# Altium footprint library LimeMicroAltiumLib.PcbLib: 876 footprints (part 1 of 57)
Each footprint in its own frame and in the unit in brackets; x right, y up, seen from the top. Pads: shape width x height; smd on the part's side, far side on the other; paste and mask are expansions set on the pad; w line width, h text height; cw(c..) or ccw(c..) is an arc to the next point about the centre after c.
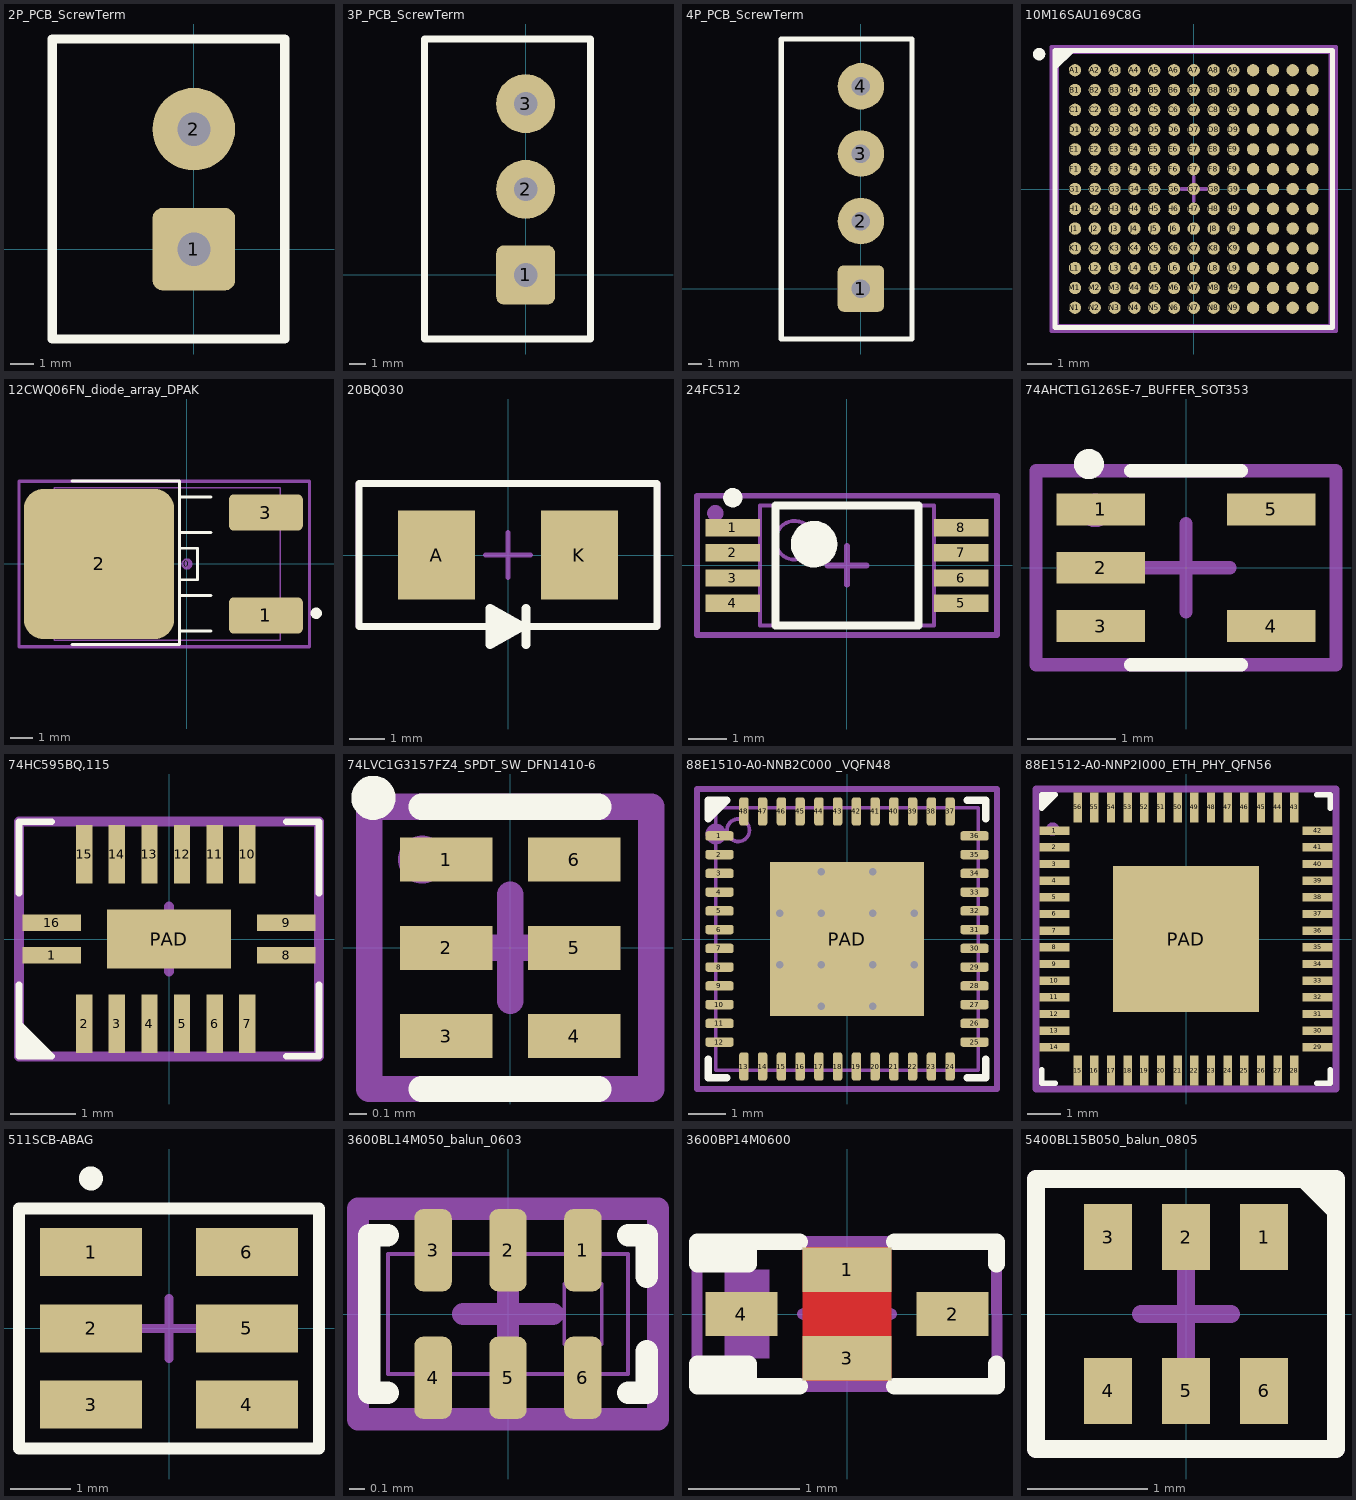
[diagram p0: the footprints below, top view; thin cyan lines are the x and y axes]

## 2P_PCB_ScrewTerm [mm] "TERM BLOCK 2POS SIDE"
height 8.5
pads (2):
  rrect25% 3.5x3.5 hole 1.4: 1(0,0)
  round 3.5 hole 1.4: 2(0,5.08)
Top Overlay:
  lines w0.4: -6,-3.8 3.85,-3.8 3.85,8.9 -6,8.9 -6,-3.8
Mechanical 13:
  lines w0.076: -6,-3.8 3.8,-3.8 3.8,8.875 -6,8.875 -6,-3.8
Mechanical 15:
  lines w0.15: 3.4,-3.8 -6,-3.8 -6,8.8 3.9,8.8 3.9,-3.8
  text ".designator" at -0.1,2.5 h0.55
3D body "terminal_blocks_a-tb500vj02h.stp": height 19, standoff -4, extent -5.503,-3.098 5,8.098

## 3P_PCB_ScrewTerm [mm] "TERM BLOCK 3POS SIDE"
height 8.5
pads (3):
  rrect25% 3.5x3.5 hole 1.4: 1(0,0)
  round 3.5 hole 1.4: 2(0,5.08) 3(0,10.16)
Top Overlay:
  lines w0.4: -6,-3.8 3.85,-3.8 3.85,14 -6,14 -6,-3.8
Mechanical 13:
  lines w0.076: -6,-3.8 3.8,-3.8 3.8,14 -6,14 -6,-3.8
Mechanical 15:
  lines w0.15: -3.4,13.96 3.8,13.96 ; 3.4,-3.8 -6,-3.8 -6,14 3.9,14 3.9,-3.8
  text ".designator" at 0,5.08 h0.55
3D body "terminal_blocks_a-tb500vj02h.stp": height 19, standoff -4, extent -5.503,1.982 5,13.178
3D body "terminal_blocks_a-tb500vj02h.stp": height 19, standoff -4, extent -5.503,-3.098 5,8.098

## 4P_PCB_ScrewTerm [mm] "TERM BLOCK 10POS SIDE ENT 3.81MM"
height 8.5
pads (4):
  rrect25% 3.5x3.5 hole 1.4: 1(0,0)
  round 3.5 hole 1.4: 2(0,5.08) 3(0,10.16) 4(0,15.24)
Top Overlay:
  lines w0.4: -6,-3.8 3.85,-3.8 3.85,18.8 -6,18.8 -6,-3.8
Mechanical 13:
  lines w0.076: -6,-3.8 3.8,-3.8 3.8,18.8 -6,18.8 -6,-3.8
Mechanical 15:
  lines w0.15: 3.4,-3.8 -6,-3.8 -6,18.8 3.9,18.8 3.9,-3.8
  text ".designator" at -0.1,7.6 h0.55
3D body "terminal_blocks_a-tb500vj02h.stp": height 19, standoff -4, extent -5.503,-2.998 5,8.198
3D body "terminal_blocks_a-tb500vj02h.stp": height 19, standoff -4, extent -5.503,6.962 5,18.158

## 10M16SAU169C8G [mm] "BGA, 169-Leads, Body 11,00x11,00mmx1,55mm, Pitch 0,80mm"
height 1.55
pads (169):
  round 0.5 smd mask+0.05: A1(-4.8,4.8) A2(-4,4.8) A3(-3.2,4.8) A4(-2.4,4.8) A5(-1.6,4.8) A6(-0.8,4.8) A7(0,4.8) A8(0.8,4.8) A9(1.6,4.8) A10(2.4,4.8) A11(3.2,4.8) A12(4,4.8) A13(4.8,4.8) B1(-4.8,4) B2(-4,4) B3(-3.2,4) B4(-2.4,4) B5(-1.6,4) B6(-0.8,4) B7(0,4) B8(0.8,4) B9(1.6,4) B10(2.4,4) B11(3.2,4) B12(4,4) B13(4.8,4) C1(-4.8,3.2) C2(-4,3.2) C3(-3.2,3.2) C4(-2.4,3.2) C5(-1.6,3.2) C6(-0.8,3.2) C7(0,3.2) C8(0.8,3.2) C9(1.6,3.2) C10(2.4,3.2) C11(3.2,3.2) C12(4,3.2) C13(4.8,3.2) D1(-4.8,2.4) D2(-4,2.4) D3(-3.2,2.4) D4(-2.4,2.4) D5(-1.6,2.4) D6(-0.8,2.4) D7(0,2.4) D8(0.8,2.4) D9(1.6,2.4) D10(2.4,2.4) D11(3.2,2.4) D12(4,2.4) D13(4.8,2.4) E1(-4.8,1.6) E2(-4,1.6) E3(-3.2,1.6) E4(-2.4,1.6) E5(-1.6,1.6) E6(-0.8,1.6) E7(0,1.6) E8(0.8,1.6) E9(1.6,1.6) E10(2.4,1.6) E11(3.2,1.6) E12(4,1.6) E13(4.8,1.6) F1(-4.8,0.8) F2(-4,0.8) F3(-3.2,0.8) F4(-2.4,0.8) F5(-1.6,0.8) F6(-0.8,0.8) F7(0,0.8) F8(0.8,0.8) F9(1.6,0.8) F10(2.4,0.8) F11(3.2,0.8) F12(4,0.8) F13(4.8,0.8) G1(-4.8,0) G2(-4,0) G3(-3.2,0) G4(-2.4,0) G5(-1.6,0) G6(-0.8,0) G7(0,0) G8(0.8,0) G9(1.6,0) G10(2.4,0) G11(3.2,0) G12(4,0) G13(4.8,0) H1(-4.8,-0.8) H2(-4,-0.8) H3(-3.2,-0.8) H4(-2.4,-0.8) H5(-1.6,-0.8) H6(-0.8,-0.8) H7(0,-0.8) H8(0.8,-0.8) H9(1.6,-0.8) H10(2.4,-0.8) H11(3.2,-0.8) H12(4,-0.8) H13(4.8,-0.8) J1(-4.8,-1.6) J2(-4,-1.6) J3(-3.2,-1.6) J4(-2.4,-1.6) J5(-1.6,-1.6) J6(-0.8,-1.6) J7(0,-1.6) J8(0.8,-1.6) J9(1.6,-1.6) J10(2.4,-1.6) J11(3.2,-1.6) J12(4,-1.6) J13(4.8,-1.6) K1(-4.8,-2.4) K2(-4,-2.4) K3(-3.2,-2.4) K4(-2.4,-2.4) K5(-1.6,-2.4) K6(-0.8,-2.4) K7(0,-2.4) K8(0.8,-2.4) K9(1.6,-2.4) K10(2.4,-2.4) K11(3.2,-2.4) K12(4,-2.4) K13(4.8,-2.4) L1(-4.8,-3.2) L2(-4,-3.2) L3(-3.2,-3.2) L4(-2.4,-3.2) L5(-1.6,-3.2) L6(-0.8,-3.2) L7(0,-3.2) L8(0.8,-3.2) L9(1.6,-3.2) L10(2.4,-3.2) L11(3.2,-3.2) L12(4,-3.2) L13(4.8,-3.2) M1(-4.8,-4) M2(-4,-4) M3(-3.2,-4) M4(-2.4,-4) M5(-1.6,-4) M6(-0.8,-4) M7(0,-4) M8(0.8,-4) M9(1.6,-4) M10(2.4,-4) M11(3.2,-4) M12(4,-4) M13(4.8,-4) N1(-4.8,-4.8) N2(-4,-4.8) N3(-3.2,-4.8) N4(-2.4,-4.8) N5(-1.6,-4.8) N6(-0.8,-4.8) N7(0,-4.8) N8(0.8,-4.8) N9(1.6,-4.8) N10(2.4,-4.8) N11(3.2,-4.8) N12(4,-4.8) N13(4.8,-4.8)
Top Overlay:
  circle w0.25: c-6.25,5.45 r0.125
  region: -4.919,5.6 -5.6,4.919 -5.6,5.6
  lines w0.2: -5.6,4.919 -4.919,5.6 ; -5.6,-5.6 -5.6,5.6 5.6,5.6 5.6,-5.6 -5.6,-5.6
Mechanical 13:
  lines w0.1: -5.5,-5.5 -5.5,5.5 5.5,5.5 5.5,-5.5 -5.5,-5.5
Mechanical 15:
  circle w0.2: c-4.8,4.8 r0.1
  lines w0.15: -0.5,0 0.5,0 ; 0,-0.5 0,0.5 ; -5.75,-5.75 -5.75,5.75 5.75,5.75 5.75,-5.75 -5.75,-5.75
  text ".Designator" at 0,0 h0.55
3D body: height 1.55, standoff 0, extent -5.5,-5.5 5.5,5.5
3D body: height 1.65, standoff 1.55, extent -5.2,4.4 -4.4,5.2

## 12CWQ06FN_diode_array_DPAK [mm]
pads (4):
  round 0.508 on Mech15: 0(0,0)
  rrect25% 3.3x1.6 smd: 1(3.526,-2.3) 3(3.526,2.3)
  rrect25% 6.7x6.7 smd: 2(-3.926,0)
Top Overlay:
  circle w0.25: c5.774,-2.2 r0.125
  lines w0.127: -5.126,-3.6 -0.326,-3.6 -0.326,3.7 -5.126,3.7 ; 1.074,-3 -0.326,-3 -0.326,-1.4 1.074,-1.4 ; 1.074,1.4 -0.326,1.4 -0.326,3 1.074,3 ; -0.326,-0.7 0.474,-0.7 0.474,0.7 -0.326,0.7 -0.326,-0.7
Mechanical 13:
  lines w0.076: -5.928,-3.4 -5.928,3.4 4.174,3.4 4.174,-3.4 -5.928,-3.4
Mechanical 15:
  circle w0.3: c3.674,-2.2 r0.1
  lines w0.15: -7.5,-3.7 5.474,-3.7 5.474,3.7 -7.5,3.7 -7.5,-3.7
  text ".Designator" at 0,0 h0.55
3D body "User Library-DPAK_TO-252AA.step": height 2.37, standoff -0.03, extent -5.928,-3.367 4.172,3.367

## 20BQ030 [mm]
pads (2):
  rect 2.15x2.5 smd: A(-2,0) K(2,0)
Top Overlay:
  lines w0.2: -4.175,-2 4.175,-2 4.175,2 -4.175,2 -4.175,0 -4.175,-2
  lines w0.254: -0.5,-2.2 -0.1,-2.2 ; -0.5,-2 -0.3,-2 0.4,-2 ; -0.5,-1.8 0,-1.8 ; 0.5,-2.5 0.5,-1.5 ; 0.4,-2 -0.5,-2.5 -0.5,-1.5 0.4,-2
Mechanical 15:
  lines w0.15: -0.625,0 0,0 ; -0.5,-2.2 -0.1,-2.2 ; -0.5,-2 -0.3,-2 0.4,-2 ; -0.5,-1.8 0,-1.8 ; 0,-0.625 0,0 ; 0,0.625 0,0 ; 0.5,-2.5 0.5,-1.5 ; 0.625,0 0,0 ; 0.4,-2 -0.5,-1.5 -0.5,-2.5 0.4,-2 ; -4.2,-2 4.2,-2 4.2,2 -4.2,2 -4.2,-2
  text ".Designator" at 0,0 h0.55

## 24FC512 [mm] "TSOP, 8-Leads, Body 3,00x4,40mm, Pitch 0,65mm, IPC Medium Density"
height 1.2
pads (8):
  rect 1.4x0.45 smd mask+0.05: 1(-2.95,0.975) 2(-2.95,0.325) 3(-2.95,-0.325) 4(-2.95,-0.975) 5(2.95,-0.975) 6(2.95,-0.325) 7(2.95,0.325) 8(2.95,0.975)
Top Overlay:
  circle w0.25: c-2.95,1.75 r0.125
  circle w0.6: c-0.85,0.55 r0.3
  lines w0.2: -1.85,-1.55 -1.85,1.55 1.85,1.55 1.85,-1.55 -1.85,-1.55
Mechanical 13:
  circle w0.1: c-1.35,0.65 r0.5
  lines w0.1: -2.25,-1.55 -2.25,1.55 2.25,1.55 2.25,-1.55 -2.25,-1.55
Mechanical 15:
  circle w0.35: c-3.4,1.35 r0.035
  lines w0.15: -0.5,0 0.5,0 ; 0,-0.5 0,0.5 ; -3.875,-1.8 -3.875,1.8 3.875,1.8 3.875,-1.8 -3.875,-1.8
  text ".Designator" at 0,0 h0.55
3D body "TSSOP-8.STEP": height 1.19, standoff -0.01, extent -3.25,-1.55 3.25,1.55

## 74AHCT1G126SE-7_BUFFER_SOT353 [mm]
pads (5):
  rect 1x0.36 smd mask+0.05: 1(-0.965,0.66) 2(-0.965,0) 3(-0.965,-0.66) 4(0.965,-0.66) 5(0.965,0.66)
Top Overlay:
  circle w0.2: c-1.1,1.175 r0.071
  lines w0.15: -0.625,-1.1 0.625,-1.1 ; -0.625,1.1 0.625,1.1
Mechanical 15:
  circle w0.2: c-1.025,0.65 r0.09
  lines w0.15: -0.5,0 0,0 ; 0,-0.5 0,0 ; 0,0.5 0,0 ; 0.5,0 0,0 ; -1.7,-1.1 1.7,-1.1 1.7,1.1 -1.7,1.1 -1.7,-1.1
  text ".Designator" at 0,0 h0.55
3D body "User Library-sot353.step": height 1, standoff 0, extent -1.15,-1.05 1.15,1.05

## 74HC595BQ,115 [mm]
pads (17):
  rect 0.9x0.25 smd mask+0.05: 1(-1.8,-0.25) 8(1.8,-0.25) 9(1.8,0.25) 16(-1.8,0.25)
  rect 0.25x0.9 smd mask+0.05: 2(-1.3,-1.3) 3(-0.8,-1.3) 4(-0.3,-1.3) 5(0.2,-1.3) 6(0.7,-1.3) 7(1.2,-1.3) 10(1.2,1.3) 11(0.7,1.3) 12(0.2,1.3) 13(-0.3,1.3) 14(-0.8,1.3) 15(-1.3,1.3)
  rect 1.9x0.9 smd paste-2 mask+0.05: PAD(0,0)
Top Overlay:
  region: -1.8,-1.8 -2.3,-1.3 -2.3,-1.8
  lines w0.1: -2.3,-1 -2.3,-1.3 -1.8,-1.8 -2.3,-1.8 -2.3,-0.7 ; -2.3,0.7 -2.3,1.8 -1.8,1.8 ; 1.8,-1.8 2.3,-1.8 2.3,-0.7 ; 1.8,1.8 2.3,1.8 2.3,0.7
Top Paste:
  region: -0.55,0.2 -0.55,-0.2 -0.15,-0.2 -0.15,0.2
  region: 0.55,0.2 0.55,-0.2 0.15,-0.2 0.15,0.2
Mechanical 15:
  circle w0.1: c-1.825,-0.25 r0.05
  lines w0.15: -0.5,0 0,0 ; 0,-0.5 0,0 ; 0,0.5 0,0 ; 0.5,0 0,0 ; -2.3,-1.8 -2.3,1.8 2.3,1.8 2.3,-1.8 -2.3,-1.8
  text ".Designator" at 0,0 h0.55
3D body: height 1, standoff 0, extent -1.8,-1.075 1.8,1.075

## 74LVC1G3157FZ4_SPDT_SW_DFN1410-6 [mm]
pads (6):
  rect 0.525x0.25 smd mask+0.05: 1(-0.363,0.5) 2(-0.363,0) 3(-0.363,-0.5) 4(0.363,-0.5) 5(0.363,0) 6(0.363,0.5)
Top Overlay:
  circle w0.15: c-0.775,0.85 r0.05
  lines w0.15: -0.5,-0.8 0.5,-0.8 ; -0.5,0.8 0.5,0.8
Mechanical 15:
  circle w0.2: c-0.5,0.5 r0.035
  lines w0.15: -0.3,0 0,0 ; 0,-0.3 0,0 ; 0,0.3 0,0 ; 0.3,0 0,0 ; -0.8,-0.8 0.8,-0.8 0.8,0.8 -0.8,0.8 -0.8,-0.8
  text ".Designator" at 0,0 h0.55
3D body: height 0.13, standoff 0, extent -0.508,-0.6 0.508,-0.4
3D body: height 0.13, standoff 0, extent -0.508,0.4 0.508,0.6
3D body: height 0.4, standoff 0, extent -0.5,-0.7 0.5,0.7
3D body: height 0.13, standoff 0, extent -0.508,-0.1 0.508,0.1

## 88E1510-A0-NNB2C000 _VQFN48 [mm] "48-VQFN package 7x7 mm"
pads (49):
  rrect50% 0.75x0.25 smd mask+0.05: 1(-3.4,2.75) 2(-3.4,2.25) 3(-3.4,1.75) 4(-3.4,1.25) 5(-3.4,0.75) 6(-3.4,0.25) 7(-3.4,-0.25) 8(-3.4,-0.75) 9(-3.4,-1.25) 10(-3.4,-1.75) 11(-3.4,-2.25) 12(-3.4,-2.75) 25(3.4,-2.75) 26(3.4,-2.25) 27(3.4,-1.75) 28(3.4,-1.25) 29(3.4,-0.75) 30(3.4,-0.25) 31(3.4,0.25) 32(3.4,0.75) 33(3.4,1.25) 34(3.4,1.75) 35(3.4,2.25) 36(3.4,2.75)
  rrect50% 0.25x0.75 smd mask+0.05: 13(-2.75,-3.4) 14(-2.25,-3.4) 15(-1.75,-3.4) 16(-1.25,-3.4) 17(-0.75,-3.4) 18(-0.25,-3.4) 19(0.25,-3.4) 20(0.75,-3.4) 21(1.25,-3.4) 22(1.75,-3.4) 23(2.25,-3.4) 24(2.75,-3.4) 37(2.75,3.4) 38(2.25,3.4) 39(1.75,3.4) 40(1.25,3.4) 41(0.75,3.4) 42(0.25,3.4) 43(-0.25,3.4) 44(-0.75,3.4) 45(-1.25,3.4) 46(-1.75,3.4) 47(-2.25,3.4) 48(-2.75,3.4)
  rect 4.1x4.1 smd paste-5 mask+0.05: PAD(0,0)
via 0.685,-0.685 diameter 0.4 hole 0.2
via 0.685,-1.8 diameter 0.4 hole 0.2
via 1.8,-0.685 diameter 0.4 hole 0.2
via -1.8,-0.685 diameter 0.4 hole 0.2
via -0.685,-1.8 diameter 0.4 hole 0.2
via -0.685,-0.685 diameter 0.4 hole 0.2
via -0.685,0.685 diameter 0.4 hole 0.2
via -0.685,1.8 diameter 0.4 hole 0.2
via -1.8,0.685 diameter 0.4 hole 0.2
via 1.8,0.685 diameter 0.4 hole 0.2
via 0.685,1.8 diameter 0.4 hole 0.2
via 0.685,0.685 diameter 0.4 hole 0.2
Top Overlay:
  region: -3.7,3.25 -3.25,3.7 -3.7,3.7
  lines w0.2: -3.7,-3.2 -3.7,-3.7 -3.2,-3.7 ; 3.2,-3.7 3.7,-3.7 3.7,-3.2 ; 3.2,3.7 3.7,3.7 3.7,3.2 ; -3.7,3.2 -3.7,3.7 -3.2,3.7 -3.7,3.2
Top Paste:
  drawing of 9 lines, arcs and shapes, not listed
Mechanical 13:
  circle w0.1: c-2.9,2.9 r0.3
  lines w0.1: -3.5,-3.5 -3.5,3.5 3.5,3.5 3.5,-3.5 -3.5,-3.5
Mechanical 15:
  circle w0.35: c-3.5,2.8 r0.1
  lines w0.15: -0.5,0 0.5,0 ; 0,-0.5 0,0.5 ; -4,-4 -4,4 4,4 4,-4 -4,-4
  text ".Designator" at 0,0 h0.55
3D body "ALSRobot-QFN48 7x7.step": height 0.78, standoff -0.02, extent -3.51,-3.51 3.51,3.51

## 88E1512-A0-NNP2I000_ETH_PHY_QFN56 [mm]
pads (57):
  rect 0.908x0.255 smd paste+0 mask+0: 1(-3.946,3.25) 2(-3.946,2.75) 3(-3.946,2.25) 4(-3.946,1.75) 5(-3.946,1.25) 6(-3.946,0.75) 7(-3.946,0.25) 8(-3.946,-0.25) 9(-3.946,-0.75) 10(-3.946,-1.25) 11(-3.946,-1.75) 12(-3.946,-2.25) 13(-3.946,-2.75) 14(-3.946,-3.25) 29(3.946,-3.25) 30(3.946,-2.75) 31(3.946,-2.25) 32(3.946,-1.75) 33(3.946,-1.25) 34(3.946,-0.75) 35(3.946,-0.25) 36(3.946,0.25) 37(3.946,0.75) 38(3.946,1.25) 39(3.946,1.75) 40(3.946,2.25) 41(3.946,2.75) 42(3.946,3.25)
  rect 0.255x0.908 smd paste+0 mask+0: 15(-3.25,-3.946) 16(-2.75,-3.946) 17(-2.25,-3.946) 18(-1.75,-3.946) 19(-1.25,-3.946) 20(-0.75,-3.946) 21(-0.25,-3.946) 22(0.25,-3.946) 23(0.75,-3.946) 24(1.25,-3.946) 25(1.75,-3.946) 26(2.25,-3.946) 27(2.75,-3.946) 28(3.25,-3.946) 43(3.25,3.946) 44(2.75,3.946) 45(2.25,3.946) 46(1.75,3.946) 47(1.25,3.946) 48(0.75,3.946) 49(0.25,3.946) 50(-0.25,3.946) 51(-0.75,3.946) 52(-1.25,3.946) 53(-1.75,3.946) 54(-2.25,3.946) 55(-2.75,3.946) 56(-3.25,3.946)
  rect 4.369x4.369 smd paste-2.172 mask+0: PAD(0,0)
Top Overlay:
  region: -4.327,3.91 -3.91,4.327 -4.327,4.327
  lines w0.152: -4.327,-3.91 -4.327,-4.327 -3.91,-4.327 ; 3.91,-4.327 4.327,-4.327 4.327,-3.91 ; 3.91,4.327 4.327,4.327 4.327,3.91 ; -4.327,3.91 -4.327,4.327 -3.91,4.327 -4.327,3.91
Mechanical 15:
  circle w0.2: c-4,3.3 r0.1
  lines w0.2: -1,0 0,0 ; 0,-1 0,0 ; 0,1 0,0 ; 1,0 0,0 ; -4.5,-4.5 -4.5,4.5 4.5,4.5 4.5,-4.5 -4.5,-4.5
  text ".Designator" at 0,0 h0.55
3D body "QFN56_MTG.step": height 0.99, standoff 0, extent -4,-4 4,4

## 511SCB-ABAG [mm]
pads (6):
  rect 1.7x0.8 smd: 1(-1.3,1.27) 2(-1.3,0) 3(-1.3,-1.27) 4(1.3,-1.27) 5(1.3,0) 6(1.3,1.27)
Top Overlay:
  circle w0.2: c-1.3,2.5 r0.1
  lines w0.2: -2.5,-2 2.5,-2 2.5,2 -2.5,2 -2.5,-2
Mechanical 15:
  circle w0.3: c-1.275,1.25 r0.071
  lines w0.15: -0.5,0 0,0 ; 0,-0.5 0,0 ; 0,0.5 0,0 ; 0.5,0 0,0 ; -2.5,-2 2.5,-2 2.5,2 -2.5,2 -2.5,-2
  text ".designator" at 0,0 h0.55
3D body: height 1, standoff 0, extent -1.75,-1.8 1.75,1.8

## 3600BL14M050_balun_0603 [mm]
pads (6):
  rrect50% 0.25x0.55 smd mask+0.04: 1(0.5,0.425) 2(0,0.425) 3(-0.5,0.425) 4(-0.5,-0.425) 5(0,-0.425) 6(0.5,-0.425)
Top Overlay:
  lines w0.15: -0.8,-0.525 -0.925,-0.525 -0.925,0.525 -0.8,0.525 ; 0.8,-0.525 0.925,-0.525 0.925,-0.25 ; 0.8,0.525 0.925,0.525 0.925,0.25
Mechanical 13:
  lines w0.025: -0.8,-0.4 0.8,-0.4 0.8,0.4 -0.8,0.4 -0.8,-0.4 ; 0.375,-0.2 0.375,0.2 0.625,0.2 0.625,-0.2 0.375,-0.2
Mechanical 15:
  circle w0.2: c0.5,0.4 r0.025
  lines w0.15: -0.3,0 0,0 ; 0,-0.3 0,0 ; 0,0.3 0,0 ; 0.3,0 0,0 ; -1,-0.7 -1,0.7 1,0.7 1,-0.7 -1,-0.7
  text ".Designator" at 0,0 h0.55
3D body: height 0.59, standoff 0.01, extent -0.8,-0.4 0.8,0.4
3D body: height 0.6, standoff 0, extent -0.1,0.26 0.1,0.41
3D body: height 0.6, standoff 0, extent -0.1,-0.41 0.1,-0.26
3D body: height 0.6, standoff 0.59, extent 0.374,-0.2 0.625,0.2
3D body: height 0.6, standoff 0, extent 0.4,0.26 0.6,0.41
3D body: height 0.6, standoff 0, extent 0.4,-0.41 0.6,-0.26
3D body: height 0.6, standoff 0, extent -0.6,0.26 -0.4,0.41
3D body: height 0.6, standoff 0, extent -0.6,-0.41 -0.4,-0.26

## 3600BP14M0600 [mm]
pads (4):
  rect 0.8x0.4 smd mask+0.05: 1(0,0.4) 3(0,-0.4)
  rect 0.65x0.4 smd mask+0.05: 2(0.95,0) 4(-0.95,0)
Top Layer:
  region: -0.375,-0.4
  region: -0.4,-0.6 -0.4,0.6 0.4,0.6 0.4,-0.6
  region: 0.375,0.425
Top Overlay:
  region: -1.346,-0.45 -1.35,-0.454 -1.35,-0.65 -0.886,-0.65 -0.886,-0.45
  region: -1.346,0.45 -1.35,0.454 -1.35,0.65 -0.886,0.65 -0.886,0.45
  lines w0.15: -0.886,-0.65 -0.886,-0.45 -1.346,-0.45 -1.346,-0.65 -0.425,-0.65 ; -0.886,0.65 -0.886,0.45 -1.346,0.45 -1.346,0.65 -0.425,0.65 ; 0.425,-0.65 1.346,-0.65 1.346,-0.45 ; 0.425,0.65 1.346,0.65 1.346,0.45
Mechanical 15:
  region: -1.1,0.4 -1.1,-0.4 -0.7,-0.4 -0.7,0.4
  lines w0.1: -1.35,-0.65 -1.35,0.65 ; -1.321,-0.65 1.346,-0.65 ; -1.321,0.65 1.346,0.65 1.35,-0.65 ; -0.4,0 0,0 ; 0,-0.4 0,0 ; 0,0.4 0,0 ; 0.4,0 0,0
  text ".Designator" at 0,0 h0.55
3D body "User Library-Murata_NFM18PC_2Amp.STEP": height 0.6, standoff 0, extent -0.8,-0.4 0.8,0.4

## 5400BL15B050_balun_0805 [mm]
pads (6):
  rect 0.4x0.55 smd mask+0.05: 1(0.65,0.64) 2(0,0.64) 3(-0.65,0.64) 4(-0.65,-0.64) 5(0,-0.64) 6(0.65,-0.64)
Top Overlay:
  region: 1.25,0.75 0.9,1.1 0.9,1.125 1.25,1.125
  lines w0.15: -1.25,-1.125 1.25,-1.125 1.25,1.125 -1.25,1.125 -1.25,-1.125
Mechanical 15:
  circle w0.1: c0.65,0.8 r0.035
  lines w0.15: -0.375,0 0,0 ; 0,-0.375 0,0 ; 0,0.375 0,0 ; 0.375,0 0,0 ; -1.25,-1.125 1.25,-1.125 1.25,1.125 -1.25,1.125 -1.25,-1.125
  text ".Designator" at 0,0 h0.55
3D body: height 0.6, standoff 0, extent -1,-0.625 1,0.625
3D body: height 0.6, standoff 0, extent -0.15,0.5 0.15,0.65
3D body: height 0.6, standoff 0, extent 0.725,0 0.925,0.238
3D body: height 0.6, standoff 0, extent -0.8,0.5 -0.5,0.65
3D body: height 0.6, standoff 0, extent 0.525,0.5 0.825,0.65
3D body: height 0.6, standoff 0, extent 0.525,-0.65 0.825,-0.5
3D body: height 0.6, standoff 0, extent -0.8,-0.65 -0.5,-0.5
3D body: height 0.6, standoff 0, extent -0.15,-0.65 0.15,-0.5